# Altium schematic symbol library BAS70LT1G.SchLib: 1 symbol
Pins are listed as number, name and electrical type; pins without a type are passive.

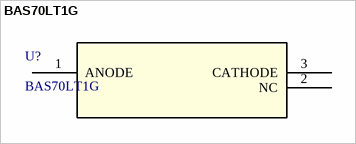
[diagram p0: symbol BAS70LT1G]

## BAS70LT1G
designator U?
No Description Available; Manufacturer_Name: onsemi; Copyright: Copyright (C) 2026 Ultra Librarian. All rights reserved.; Manufacturer_Part_Number: BAS70LT1G; RefDes: RefDes; Type: Type
footprint SOT-23_ONS
pins: 1 ANODE, 2 NC, 3 CATHODE